# EAGLE library part ADXL312ACPZ (library ADXL312ACPZ)
Analog Devices ADXL312ACPZ 3-Axis Accelerometer IC, 2 3.6 V 32-Pin LFCSP LQ Source: Datasheet <https://www.analog.com/media/en/technical-documentation/data-sheets/ADXL312.pdf>
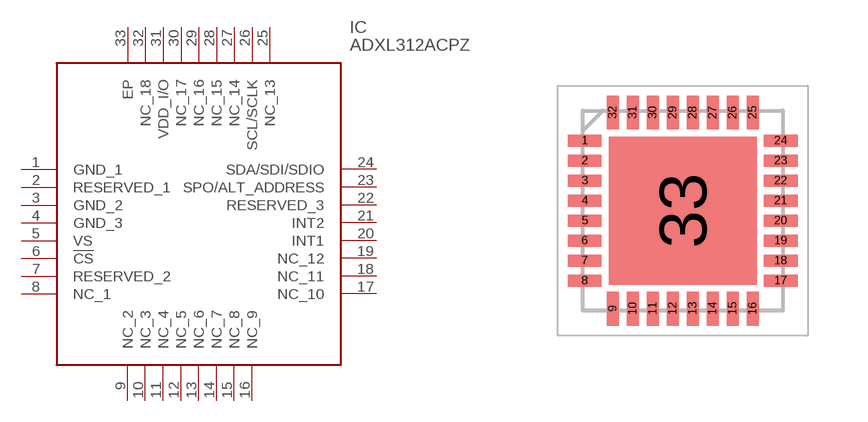
[diagram p0: symbol with the pads of QFN50P500X500X155-33N; footprint QFN50P500X500X155-33N]

Designator prefix IC

## ADXL312ACPZ (Description: Analog Devices ADXL312ACPZ 3-Axis Accelerometer IC, 2 3.6 V 32-Pin LFCSP LQ; Height: 1.55mm; Manufacturer_Name: Analog Devices; Manufacturer_Part_Number: ADXL312ACPZ; Mouser_Part_Number: 584-ADXL312ACPZ; Mouser_Price-Stock: https://www.mouser.co.uk/ProductDetail/Analog-Devices/ADXL312ACPZ?qs=WIvQP4zGanh2mViyx1IC4g%3D%3D)  [QFN50P500X500X155-33N]
1  GND_1
2  RESERVED_1
3  GND_2
4  GND_3
5  VS
6  !CS
7  RESERVED_2
8  NC_1
9  NC_2
10  NC_3
11  NC_4
12  NC_5
13  NC_6
14  NC_7
15  NC_8
16  NC_9
17  NC_10
18  NC_11
19  NC_12
20  INT1
21  INT2
22  RESERVED_3
23  SPO/ALT_ADDRESS
24  SDA/SDI/SDIO
25  NC_13
26  SCL/SCLK
27  NC_14
28  NC_15
29  NC_16
30  NC_17
31  VDD_I/O
32  NC_18
33  EP

## Footprint QFN50P500X500X155-33N (pad centres in mm)
(CP-32-17)_2022
smd 0.85 x 0.3: 1 -2.45,1.75; 2 -2.45,1.25; 3 -2.45,0.75; 4 -2.45,0.25; 5 -2.45,-0.25; 6 -2.45,-0.75; 7 -2.45,-1.25; 8 -2.45,-1.75; 17 2.45,-1.75; 18 2.45,-1.25; 19 2.45,-0.75; 20 2.45,-0.25; 21 2.45,0.25; 22 2.45,0.75; 23 2.45,1.25; 24 2.45,1.75
smd 0.3 x 0.85: 9 -1.75,-2.45; 10 -1.25,-2.45; 11 -0.75,-2.45; 12 -0.25,-2.45; 13 0.25,-2.45; 14 0.75,-2.45; 15 1.25,-2.45; 16 1.75,-2.45; 25 1.75,2.45; 26 1.25,2.45; 27 0.75,2.45; 28 0.25,2.45; 29 -0.25,2.45; 30 -0.75,2.45; 31 -1.25,2.45; 32 -1.75,2.45
smd 3.7 x 3.7: 33 0,0